# Altium schematic symbol library PS1223-D32_R1_00301.SchLib: 1 symbol
Pins are listed as number, name and electrical type; pins without a type are passive.

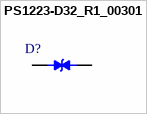
[diagram p0: symbol PS1223-D32_R1_00301]

## PS1223-D32_R1_00301
designator D?
3.5V Clamp 5A (8/20µs) Ipp Tvs Diode Surface Mount DFN0603-2; Manufacturer_Name: Venkel; Manufacturer_Part_Number: C0201X5R6R3-104MNP; Copyright: Copyright (C) 2026 Ultra Librarian. All rights reserved.; ComponentLink1Description: Digikey link; ComponentLink1URL: https://www.digikey.com/en/products/detail/panjit-international-inc/PS1223-D32-R1-00301/25319810
footprint CAP_C0201_VEN
pins: 1, 2